# Altium integrated library AMS1117-5.IntLib: 1 symbol
Pins are listed as number, name and electrical type; pins without a type are passive.

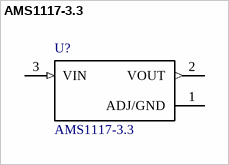
[diagram p0: symbol AMS1117-3.3]

## AMS1117-3.3
designator U?
MF: AMD; SnapEDA_Link: https://www.snapeda.com/parts/AMS1117-3.3/AMD/view-part/?ref=snap; Availability: Unavailable; Package: None; Price: None; MP: AMS1117-3.3; Value: *
footprint *SOT229P700X180-4N
pins: 1 ADJ/GND (power), 2 VOUT (out), 3 VIN (in)